# Altium integrated library KOM_ACB23_4009.IntLib: 45 symbols
Pins are listed as number, name and electrical type; pins without a type are passive.

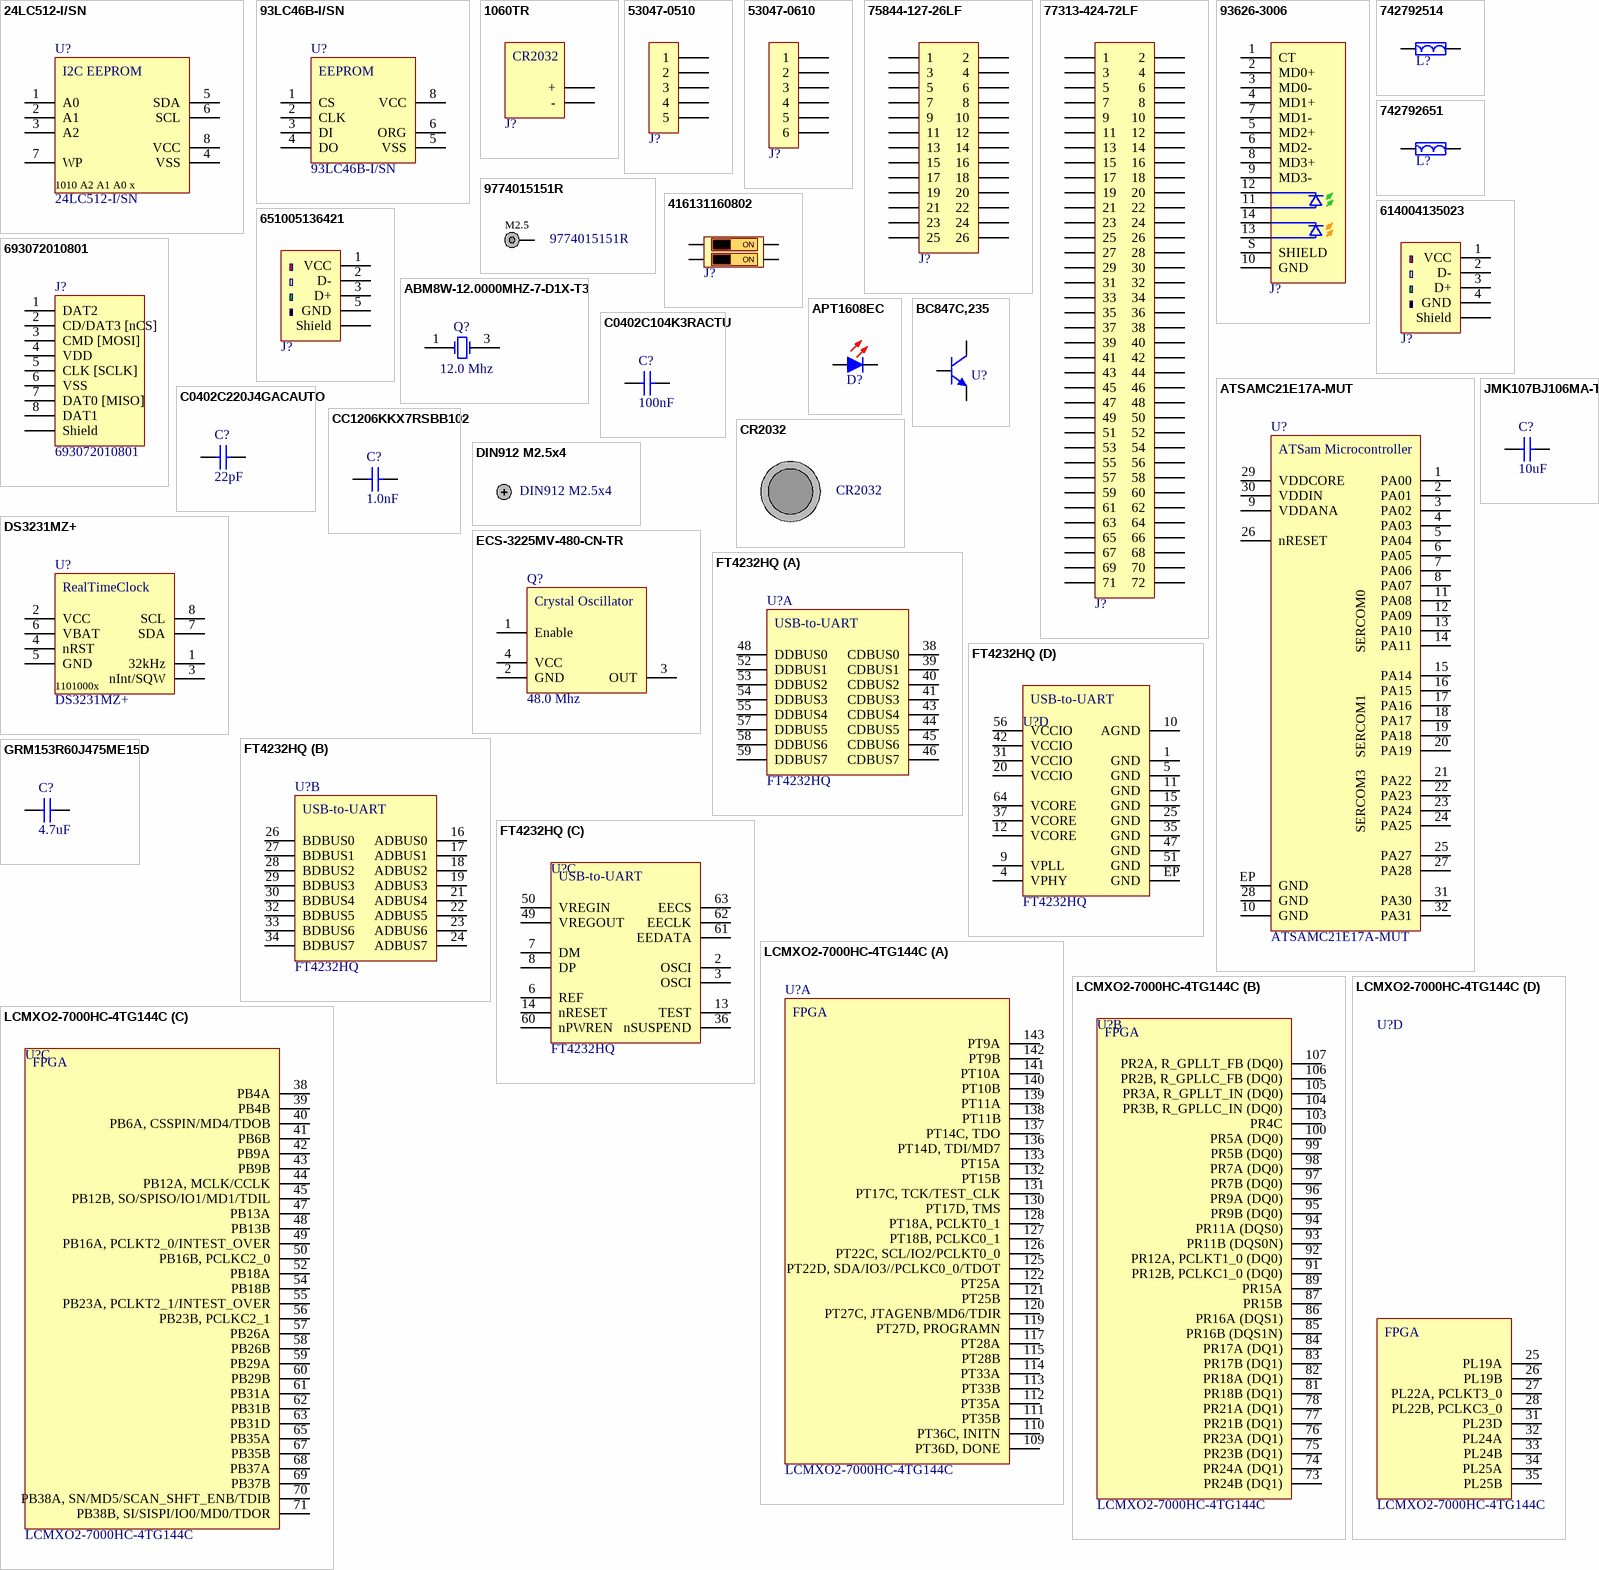
[diagram p0: symbols 24LC512-I/SN to LCMXO2-7000HC-4TG144C]

## 24LC512-I/SN
designator U?
I2C EEPROM with 64kBit Memory; Type: SMD; Package: SOIC-8; Supplier 1: Mouser; Supplier Part Number 1: 579-24LC512-I/SN
footprint soic-8 (SOIC-8 Width 150mil)
pins: 1 A0, 2 A1, 3 A2, 4 VSS, 5 SDA, 6 SCL, 7 WP, 8 VCC
text: I2C EEPROM; 1010 A2 A1 A0 x

## 93LC46B-I/SN
designator U?
1K Microwire Compatible Serial EEPROM; Type: SMD; Supplier 1: Mouser; Supplier Part Number 1: 579-93LC46BISN
footprint SOIC-8 (SOIC-8 Width 150mil)
pins: 1 CS, 2 CLK, 3 DI, 4 DO, 5 VSS, 6 ORG, 8 VCC
text: EEPROM

## 1060TR
designator J?  (value not drawn)
Knopfzellen-Batteriehalter SMD; Type: SMD; Package: -; Supplier 1: Mouser; Supplier Part Number 1: 534-1060TR
footprint 1060TR (Batteriehalter CR2032)
pins: +, -
text: CR2032

## 53047-0510
designator J?  (value not drawn)
PicoBlade 01x05 Male THT; Type: THT; Package: -; Supplier 1: Mouser; Supplier Part Number 1: 538-53047-0510
footprint PicoBlade 01x05 THT Male
pins: 1, 2, 3, 4, 5

## 53047-0610
designator J?  (value not drawn)
PicoBlade 01x06 Male THT; Type: THT; Package: -; Supplier 1: Mouser; Supplier Part Number 1: 538-53047-0610
footprint PicoBlade 01x06 THT Male
pins: 1, 2, 3, 4, 5, 6

## 75844-127-26LF
designator J?  (value not drawn)
Pinheader 02x13 Male THT; Type: THT; Package: -; Supplier 1: Mouser; Supplier Part Number 1: 649-75844-127-26LF
footprint Pinheader 02x13
pins: 1, 2, 3, 4, 5, 6, 7, 8, 9, 10, 11, 12, 13, 14, 15, 16, 17, 18, 19, 20, 21, 22, 23, 24, 25, 26

## 77313-424-72LF
designator J?  (value not drawn)
Pinheader 02x36 Male THT; Type: THT; Package: -; Supplier 1: Mouser; Supplier Part Number 1: 649-77313-424-72LF
footprint Pinheader 02x36
pins: 1, 2, 3, 4, 5, 6, 7, 8, 9, 10, 11, 12, 13, 14, 15, 16, 17, 18, 19, 20, 21, 22, 23, 24, 25, 26, 27, 28, 29, 30, 31, 32, 33, 34, 35, 36, 37, 38, 39, 40, 41, 42, 43, 44, 45, 46, 47, 48, 49, 50, 51, 52, 53, 54, 55, 56, 57, 58, 59, 60, 61, 62, 63, 64, 65, 66, 67, 68, 69, 70, 71, 72

## 93626-3006
designator J?  (value not drawn)
RJ45 MagJack 1Gbit; Type: THT; Package: -; Supplier 1: Mouser; Supplier Part Number 1: 538-93626-3006
footprint 93626-3508 (Molex MagJack 1Gbit without POE)
pins: 1 CT, 2 MD0+, 3 MD0-, 4 MD1+, 5 MD2+, 6 MD2-, 7 MD1-, 8 MD3+, 9 MD3-, 10 GND (power), 11 GA, 12, 13 YA, 14 YK, S SHIELD

## 742792514
designator L?  (value not drawn)
Ferritperle 3A; Type: SMD; Package: 1812; Supplier 1: Mouser; Supplier Part Number 1: 710-742792514
footprint L1812
pins: 1, 2

## 742792651
designator L?  (value not drawn)
Ferritperle 1A; Type: SMD; Package: 0603; Supplier 1: Mouser; Supplier Part Number 1: 710-742792651
footprint L0603
pins: 1, 2

## 9774015151R
designator MH?
WA-SMSE SMD Steel M2.5 Internal 2.9mm; Type: THT; Supplier 1: Mouser; Supplier Part Number 1: 710-9774015151R
footprint 9774015151R (WA-SMSE SMD Steel M2.5 Internal L2.9mm (1.5mm))
pins: 1
text: M2.5

## 416131160802
designator J?  (value not drawn)
DIP switch SMD 2P; Type: SMD; Supplier 1: Mouser; Supplier Part Number 1: 710-416131160802
footprint 416131160802
pins: L1, L2, R1, R2
text: ON

## 614004135023
designator J?  (value not drawn)
USB A Female Vertical THT; Type: THT; Package: -; Supplier 1: Mouser; Supplier Part Number 1: 710-614004135023; Supplier 2: Digi-Key; Supplier Part Number 2: 732-2732-ND
footprint 614004135023 (4 pins)
pins: 1 VCC, 2 D-, 3 D+, 4 GND, S Shield

## 651005136421
designator J?  (value not drawn)
MiniUSB B Female Vertical THT; Type: THT; Supplier 1: Mouser; Supplier Part Number 1: 710-651005136421
footprint USB MiniUSB B Vertical THT (5787834-2)
pins: 1 VCC, 2 D-, 3 D+, 5 GND, S Shield

## 693072010801
designator J?
WR-CRD Micro SD Card Connector; Type: SMD; Supplier 1: Mouser; Supplier Part Number 1: 710-693072010801
footprint 693072010801 (Micro SD Card Connector Hinge - 8 Pins)
pins: 1 DAT2, 2 CD/DAT3 [nCS], 3 CMD [MOSI], 4 VDD, 5 CLK [SCLK], 6 VSS, 7 DAT0 [MISO], 8 DAT1, Shield

## ABM8W-12.0000MHZ-7-D1X-T3
designator Q?  value 12.0 Mhz  (hidden comment: ABM8W-12.0000MHZ-7-D1X-T3)
Crystal 12 Mhz 3.2 x 2.5; Type: SMD; Package: 3.2x2.5; Supplier 1: Mouser; Supplier Part Number 1: 815-8W12-7D1XT
footprint Crystal_3.2x2.5
pins: 1 OSC1, 3 OSC2

## APT1608EC
designator D?  (value not drawn)
SMD LED 0603 RED; Type: SMD; Package: 0603; Supplier 1: Mouser; Supplier Part Number 1: 604-APT1608EC
footprint LED 0603 RED
pins: 1 A, 2 K

## ATSAMC21E17A-MUT
designator U?
32-Bit ATSam ARM 128KB Flash; Type: SMD; Package: QFN32; Supplier 1: Mouser; Supplier Part Number 1: 556-ATSAMC21E17A-MUT
footprint QFN32_5x5_0.50
pins: 1 PA00, 2 PA01, 3 PA02, 4 PA03, 5 PA04, 6 PA05, 7 PA06, 8 PA07, 9 VDDANA, 10 GND, 11 PA08, 12 PA09, 13 PA10, 14 PA11, 15 PA14, 16 PA15, 17 PA16, 18 PA17, 19 PA18, 20 PA19, 21 PA22, 22 PA23, 23 PA24, 24 PA25, 25 PA27, 26 nRESET, 27 PA28, 28 GND, 29 VDDCORE, 30 VDDIN, 31 PA30, 32 PA31, EP GND
text: ATSam Microcontroller; SERCOM0; SERCOM1; SERCOM3

## BC847C,235
designator U?  (value not drawn)
45 V, 100 mA NPN general-purpose transistor; Package: SOT23; Type: SMD; Supplier 1: Mouser; Supplier Part Number 1: 771-BC847C235
footprint SOT-23-3
pins: 1 B, 2 E, 3 C

## C0402C104K3RACTU
designator C?  value 100nF  (hidden comment: C0402C104K3RACTU)
0402 100nF 25.0V; Type: SMD; Package: 0402; Supplier 1: Mouser; Supplier Part Number 1: 80-C0402C104K3R
footprint C0402
pins: 1, 2

## C0402C220J4GACAUTO
designator C?  value 22pF  (hidden comment: C0402C220J4GACAUTO)
0402 22pF 16V; Type: SMD; Package: 0402; Supplier 1: Mouser; Supplier Part Number 1: 80-C0402C220J4GAUTO
footprint C0402
pins: 1, 2

## CC1206KKX7RSBB102
designator C?  value 1.0nF  (hidden comment: CC1206KKX7RSBB102)
1206 1nF 2.5kV; Type: SMD; Package: 1206; Supplier 1: Mouser; Supplier Part Number 1: 603-CC1206KKX7RSBB10
footprint C1206
pins: 1, 2

## CR2032
designator BAT?
CR2032 Battery; Type: Mechanical
footprint CR2032

## DIN912 M2.5x4
designator S?
Type: Mechanical
footprint DIN912 M2.5x4

## DS3231MZ+
designator U?
Extremely Accurate I2C-IntegratedRTC/TCXO/Crystal; Type: SMD; Supplier 1: Mouser; Supplier Part Number 1: 700-DS3231MZ+
footprint SOIC-8 (SOIC-8 Width 150mil)
pins: 1 32kHz, 2 VCC, 3 nInt/SQW, 4 nRST, 5 GND, 6 VBAT, 7 SDA, 8 SCL
text: RealTimeClock; 1101000x

## ECS-3225MV-480-CN-TR
designator Q?  value 48.0 Mhz  (hidden comment: ECS-3225MV-480-CN-TR)
Oscillator 48 Mhz 3.2 x 2.5; Type: SMD; Package: 3.2x2.5; Supplier 1: Mouser; Supplier Part Number 1: 520-3225MV-480-CNT
footprint Crystal_3.2x2.5
pins: 1 Enable "Option", 2 GND, 3 OUT, 4 VCC
text: Crystal Oscillator

## FT4232HQ
designator U?
USB-IC-Schnittstelle USB to Serial UART QuadPort; Type: SMD; Supplier 1: Mouser; Supplier Part Number 1: 895-FT4232HQ
footprint QFN64_9x9_0.50
part A pins: 38 CDBUS0, 39 CDBUS1, 40 CDBUS2, 41 CDBUS3, 43 CDBUS4, 44 CDBUS5, 45 CDBUS6, 46 CDBUS7, 48 DDBUS0, 52 DDBUS1, 53 DDBUS2, 54 DDBUS3, 55 DDBUS4, 57 DDBUS5, 58 DDBUS6, 59 DDBUS7
part B pins: 16 ADBUS0, 17 ADBUS1, 18 ADBUS2, 19 ADBUS3, 21 ADBUS4, 22 ADBUS5, 23 ADBUS6, 24 ADBUS7, 26 BDBUS0, 27 BDBUS1, 28 BDBUS2, 29 BDBUS3, 30 BDBUS4, 32 BDBUS5, 33 BDBUS6, 34 BDBUS7
part C pins: 2 OSCI, 3 OSCI, 6 REF, 7 DM, 8 DP, 13 TEST, 14 nRESET, 36 nSUSPEND, 49 VREGOUT, 50 VREGIN, 60 nPWREN, 61 EEDATA, 62 EECLK, 63 EECS
part D pins: 1 GND, 4 VPHY, 5 GND, 9 VPLL, 10 AGND, 11 GND, 12 VCORE, 15 GND, 20 VCCIO, 25 GND, 31 VCCIO, 35 GND, 37 VCORE, 42 VCCIO, 47 GND, 51 GND, 56 VCCIO, 64 VCORE, EP GND
part A text: USB-to-UART
part B text: USB-to-UART
part C text: USB-to-UART
part D text: USB-to-UART

## GRM153R60J475ME15D
designator C?  value 4.7uF  (hidden comment: GRM153R60J475ME15D)
0402 4.7uF 6.3V; Type: SMD; Package: 0402; Supplier 1: Mouser; Supplier Part Number 1: 81-GRM153R60J475ME5D
footprint C0402
pins: 1, 2

## JMK107BJ106MA-T
designator C?  value 10uF  (hidden comment: JMK107BJ106MA-T)
0603 10uF 6.3V; Type: SMD; Package: 0603; Supplier 1: Mouser; Supplier Part Number 1: 963-JMK107BJ106MA-T
footprint C0603
pins: 1, 2

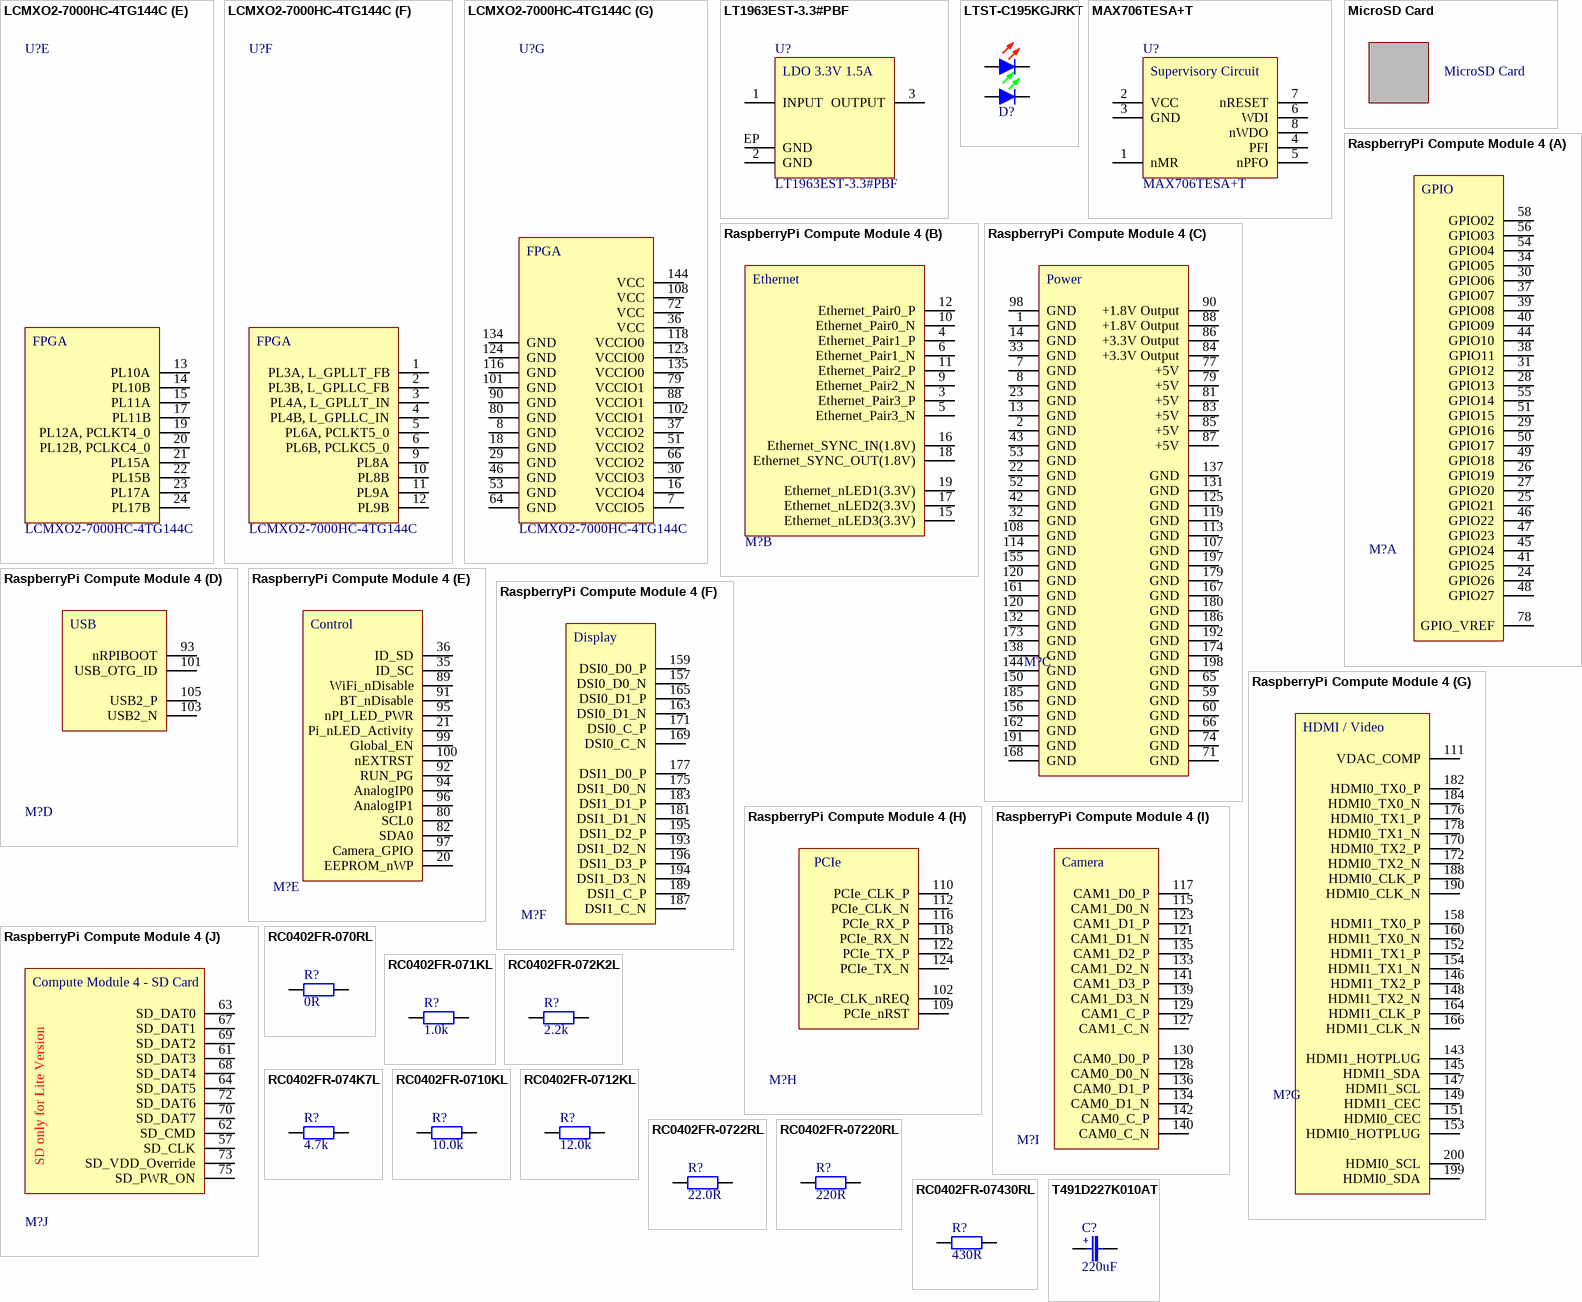
[diagram p1: symbols LCMXO2-7000HC-4TG144C to T491D227K010AT]

## LCMXO2-7000HC-4TG144C
designator U?
MachXO2 High Performance; 7000 LUTs; 3.3V; Type: SMD; Package: TQFP-144; Supplier 1: Mouser; Supplier Part Number 1: 842-27000HC4TG144C
footprint TQFP-144_20x20_P0.5
part A pins: 109 PT36D, DONE, 110 PT36C, INITN, 111 PT35B, 112 PT35A, 113 PT33B, 114 PT33A, 115 PT28B, 117 PT28A, 119 PT27D, PROGRAMN, 120 PT27C, JTAGENB/MD6/TDIR, 121 PT25B, 122 PT25A, 125 PT22D, SDA/IO3//PCLKC0_0/TDOT, 126 PT22C, SCL/IO2/PCLKT0_0, 127 PT18B, PCLKC0_1, 128 PT18A, PCLKT0_1, 130 PT17D, TMS, 131 PT17C, TCK/TEST_CLK, 132 PT15B, 133 PT15A, 136 PT14D, TDI/MD7, 137 PT14C, TDO, 138 PT11B, 139 PT11A, 140 PT10B, 141 PT10A, 142 PT9B, 143 PT9A
part B pins: 73 PR24B (DQ1), 74 PR24A (DQ1), 75 PR23B (DQ1), 76 PR23A (DQ1), 77 PR21B (DQ1), 78 PR21A (DQ1), 81 PR18B (DQ1), 82 PR18A (DQ1), 83 PR17B (DQ1), 84 PR17A (DQ1), 85 PR16B (DQS1N), 86 PR16A (DQS1), 87 PR15B, 89 PR15A, 91 PR12B, PCLKC1_0 (DQ0), 92 PR12A, PCLKT1_0 (DQ0), 93 PR11B (DQS0N), 94 PR11A (DQS0), 95 PR9B (DQ0), 96 PR9A (DQ0), 97 PR7B (DQ0), 98 PR7A (DQ0), 99 PR5B (DQ0), 100 PR5A (DQ0), 103 PR4C, 104 PR3B, R_GPLLC_IN (DQ0), 105 PR3A, R_GPLLT_IN (DQ0), 106 PR2B, R_GPLLC_FB (DQ0), 107 PR2A, R_GPLLT_FB (DQ0)
part C pins: 38 PB4A, 39 PB4B, 40 PB6A, CSSPIN/MD4/TDOB, 41 PB6B, 42 PB9A, 43 PB9B, 44 PB12A, MCLK/CCLK, 45 PB12B, SO/SPISO/IO1/MD1/TDIL, 47 PB13A, 48 PB13B, 49 PB16A, PCLKT2_0/INTEST_OVER, 50 PB16B, PCLKC2_0, 52 PB18A, 54 PB18B, 55 PB23A, PCLKT2_1/INTEST_OVER, 56 PB23B, PCLKC2_1, 57 PB26A, 58 PB26B, 59 PB29A, 60 PB29B, 61 PB31A, 62 PB31B, 63 PB31D, 65 PB35A, 67 PB35B, 68 PB37A, 69 PB37B, 70 PB38A, SN/MD5/SCAN_SHFT_ENB/TDIB, 71 PB38B, SI/SISPI/IO0/MD0/TDOR
part D pins: 25 PL19A, 26 PL19B, 27 PL22A, PCLKT3_0, 28 PL22B, PCLKC3_0, 31 PL23D, 32 PL24A, 33 PL24B, 34 PL25A, 35 PL25B
part E pins: 13 PL10A, 14 PL10B, 15 PL11A, 17 PL11B, 19 PL12A, PCLKT4_0, 20 PL12B, PCLKC4_0, 21 PL15A, 22 PL15B, 23 PL17A, 24 PL17B
part F pins: 1 PL3A, L_GPLLT_FB, 2 PL3B, L_GPLLC_FB, 3 PL4A, L_GPLLT_IN, 4 PL4B, L_GPLLC_IN, 5 PL6A, PCLKT5_0, 6 PL6B, PCLKC5_0, 9 PL8A, 10 PL8B, 11 PL9A, 12 PL9B
part G pins: 7 VCCIO5 (power), 8 GND (power), 16 VCCIO4 (power), 18 GND (power), 29 GND (power), 30 VCCIO3 (power), 36 VCC (power), 37 VCCIO2 (power), 46 GND (power), 51 VCCIO2 (power), 53 GND (power), 64 GND (power), 66 VCCIO2 (power), 72 VCC (power), 79 VCCIO1 (power), 80 GND (power), 88 VCCIO1 (power), 90 GND (power), 101 GND (power), 102 VCCIO1 (power), 108 VCC (power), 116 GND (power), 118 VCCIO0 (power), 123 VCCIO0 (power), 124 GND (power), 134 GND (power), 135 VCCIO0 (power), 144 VCC (power)
part A text: FPGA
part B text: FPGA
part C text: FPGA
part D text: FPGA
part E text: FPGA
part F text: FPGA
part G text: FPGA

## LT1963EST-3.3#PBF
designator U?
LDO Spannungs-Regulator 1.5A 3.3V; Package: SOT-223-2; Type: SMD; Supplier 1: Mouser; Supplier Part Number 1: 584-LT1963EST-3.3PBF
footprint SOT-223-2
pins: 1 INPUT, 2 GND, 3 OUTPUT, EP GND
text: LDO 3.3V 1.5A

## LTST-C195KGJRKT
designator D?  (value not drawn)
SMD LED 0606 Dual RED GREEN; Type: SMD; Package: 0603; Supplier 1: Mouser; Supplier Part Number 1: 859-LTST-C195KGJRKT
footprint SMD LED 0606 DUAL GREEN RED
pins: 1 AG, 2 AR, 3 KG, 4 KR

## MAX706TESA+T
designator U?
+3V Voltage Monitoring, Low-Cost μP Supervisory Circuit; Type: SMD; Supplier 1: Mouser; Supplier Part Number 1: 700-MAX706TESAT
footprint SOIC-8 (SOIC-8 Width 150mil)
pins: 1 nMR, 2 VCC, 3 GND, 4 PFI, 5 nPFO, 6 WDI, 7 nRESET, 8 nWDO
text: Supervisory Circuit

## MicroSD Card
designator SD?
Type: Mechanical
footprint MicroSDCard

## RaspberryPi Compute Module 4
designator M?  (value not drawn)
Compute Module 4 Socket; Type: SMD; Package: -; Supplier 1: Mouser; Supplier Part Number 1: 798-DF40C100DS0.4V51
footprint RaspberryComputeModule4
part A pins: 24 GPIO26, 25 GPIO21, 26 GPIO19, 27 GPIO20, 28 GPIO13, 29 GPIO16, 30 GPIO06, 31 GPIO12, 34 GPIO05, 37 GPIO07, 38 GPIO11, 39 GPIO08, 40 GPIO09, 41 GPIO25, 44 GPIO10, 45 GPIO24, 46 GPIO22, 47 GPIO23, 48 GPIO27, 49 GPIO18, 50 GPIO17, 51 GPIO15, 54 GPIO04, 55 GPIO14, 56 GPIO03, 58 GPIO02, 78 GPIO_VREF
part B pins: 3 Ethernet_Pair3_P, 4 Ethernet_Pair1_P, 5 Ethernet_Pair3_N, 6 Ethernet_Pair1_N, 9 Ethernet_Pair2_N, 10 Ethernet_Pair0_N, 11 Ethernet_Pair2_P, 12 Ethernet_Pair0_P, 15 Ethernet_nLED3(3.3V), 16 Ethernet_SYNC_IN(1.8V), 17 Ethernet_nLED2(3.3V), 18 Ethernet_SYNC_OUT(1.8V), 19 Ethernet_nLED1(3.3V)
part C pins: 1 GND, 2 GND, 7 GND, 8 GND, 13 GND, 14 GND, 22 GND, 23 GND, 32 GND, 33 GND, 42 GND, 43 GND, 52 GND, 53 GND, 59 GND, 60 GND, 65 GND, 66 GND, 71 GND, 74 GND, 77 +5V, 79 +5V, 81 +5V, 83 +5V, 84 +3.3V Output, 85 +5V, 86 +3.3V Output, 87 +5V, 88 +1.8V Output, 90 +1.8V Output, 98 GND, 107 GND, 108 GND, 113 GND, 114 GND, 119 GND, 120 GND, 120 GND, 125 GND, 131 GND, 132 GND, 137 GND, 138 GND, 144 GND, 150 GND, 155 GND, 156 GND, 161 GND, 162 GND, 167 GND, 168 GND, 173 GND, 174 GND, 179 GND, 180 GND, 185 GND, 186 GND, 191 GND, 192 GND, 197 GND, 198 GND
part D pins: 93 nRPIBOOT, 101 USB_OTG_ID, 103 USB2_N, 105 USB2_P
part E pins: 20 EEPROM_nWP, 21 Pi_nLED_Activity, 35 ID_SC, 36 ID_SD, 80 SCL0, 82 SDA0, 89 WiFi_nDisable, 91 BT_nDisable, 92 RUN_PG, 94 AnalogIP0, 95 nPI_LED_PWR, 96 AnalogIP1, 97 Camera_GPIO, 99 Global_EN, 100 nEXTRST
part F pins: 157 DSI0_D0_N, 159 DSI0_D0_P, 163 DSI0_D1_N, 165 DSI0_D1_P, 169 DSI0_C_N, 171 DSI0_C_P, 175 DSI1_D0_N, 177 DSI1_D0_P, 181 DSI1_D1_N, 183 DSI1_D1_P, 187 DSI1_C_N, 189 DSI1_C_P, 193 DSI1_D2_N, 194 DSI1_D3_N, 195 DSI1_D2_P, 196 DSI1_D3_P
part G pins: 111 VDAC_COMP, 143 HDMI1_HOTPLUG, 145 HDMI1_SDA, 146 HDMI1_TX2_P, 147 HDMI1_SCL, 148 HDMI1_TX2_N, 149 HDMI1_CEC, 151 HDMI0_CEC, 152 HDMI1_TX1_P, 153 HDMI0_HOTPLUG, 154 HDMI1_TX1_N, 158 HDMI1_TX0_P, 160 HDMI1_TX0_N, 164 HDMI1_CLK_P, 166 HDMI1_CLK_N, 170 HDMI0_TX2_P, 172 HDMI0_TX2_N, 176 HDMI0_TX1_P, 178 HDMI0_TX1_N, 182 HDMI0_TX0_P, 184 HDMI0_TX0_N, 188 HDMI0_CLK_P, 190 HDMI0_CLK_N, 199 HDMI0_SDA, 200 HDMI0_SCL
part H pins: 102 PCIe_CLK_nREQ, 109 PCIe_nRST, 110 PCIe_CLK_P, 112 PCIe_CLK_N, 116 PCIe_RX_P, 118 PCIe_RX_N, 122 PCIe_TX_P, 124 PCIe_TX_N
part I pins: 115 CAM1_D0_N, 117 CAM1_D0_P, 121 CAM1_D1_N, 123 CAM1_D1_P, 127 CAM1_C_N, 128 CAM0_D0_N, 129 CAM1_C_P, 130 CAM0_D0_P, 133 CAM1_D2_N, 134 CAM0_D1_N, 135 CAM1_D2_P, 136 CAM0_D1_P, 139 CAM1_D3_N, 140 CAM0_C_N, 141 CAM1_D3_P, 142 CAM0_C_P
part J pins: 57 SD_CLK, 61 SD_DAT3, 62 SD_CMD, 63 SD_DAT0, 64 SD_DAT5, 67 SD_DAT1, 68 SD_DAT4, 69 SD_DAT2, 70 SD_DAT7, 72 SD_DAT6, 73 SD_VDD_Override, 75 SD_PWR_ON
part A text: GPIO
part B text: Ethernet
part C text: Power
part D text: USB
part E text: Control
part F text: Display
part G text: HDMI / Video
part H text: PCIe
part I text: Camera
part J text: Compute Module 4 - SD Card; SD only for Lite Version

## RC0402FR-070RL
designator R?  value 0R  (hidden comment: RC0402FR-070RL)
0402 0R; Type: SMD; Package: 0402; Supplier 1: Mouser; Supplier Part Number 1: 603-RC0402FR-070RL
footprint R0402
pins: 1, 2

## RC0402FR-071KL
designator R?  value 1.0k  (hidden comment: RC0402FR-071KL)
0402 1.0K; Type: SMD; Package: 0402; Supplier 1: Mouser; Supplier Part Number 1: 603-RC0402FR-071KL
footprint R0402
pins: 1, 2

## RC0402FR-072K2L
designator R?  value 2.2k  (hidden comment: RC0402FR-072K2L)
0402 2.2K; Type: SMD; Package: 0402; Supplier 1: Mouser; Supplier Part Number 1: 603-RC0402FR-072K2L
footprint R0402
pins: 1, 2

## RC0402FR-074K7L
designator R?  value 4.7k  (hidden comment: RC0402FR-074K7L)
0402 4.7K; Type: SMD; Package: 0402; Supplier 1: Mouser; Supplier Part Number 1: 603-RC0402FR-074K7L
footprint R0402
pins: 1, 2

## RC0402FR-0710KL
designator R?  value 10.0k  (hidden comment: RC0402FR-0710KL)
0402 10.0K; Type: SMD; Package: 0402; Supplier 1: Mouser; Supplier Part Number 1: 603-RC0402FR-0710KL
footprint R0402
pins: 1, 2

## RC0402FR-0712KL
designator R?  value 12.0k  (hidden comment: RC0402FR-0712KL)
0402 12.0K; Type: SMD; Package: 0402; Supplier 1: Mouser; Supplier Part Number 1: 603-RC0402FR-0712KL
footprint R0402
pins: 1, 2

## RC0402FR-0722RL
designator R?  value 22.0R  (hidden comment: RC0402FR-0722RL)
0402 22.0R; Type: SMD; Package: 0402; Supplier 1: Mouser; Supplier Part Number 1: 603-RC0402FR-0722RL
footprint R0402
pins: 1, 2

## RC0402FR-07220RL
designator R?  value 220R  (hidden comment: RC0402FR-07220RL)
0402 220R; Type: SMD; Package: 0402; Supplier 1: Mouser; Supplier Part Number 1: 603-RC0402FR-07220RL
footprint R0402
pins: 1, 2

## RC0402FR-07430RL
designator R?  value 430R  (hidden comment: RC0402FR-07430RL)
0402 430R; Type: SMD; Package: 0402; Supplier 1: Mouser; Supplier Part Number 1: 603-RC0402FR-07430RL
footprint R0402
pins: 1, 2

## T491D227K010AT
designator C?  value 220uF  (hidden comment: T491D227K010AT)
Tantal 7.3x4.3 220uF 10V; Type: SMD; Package: -; Supplier 1: Mouser; Supplier Part Number 1: 80-T491D227K010
footprint TANTAL_7343
pins: 1, 2
text: +